# Altium footprint library C1210C226J8RAC7800.PcbLib: 3 footprints
Each footprint in its own frame and in the unit in brackets; x right, y up, seen from the top. Pads: shape width x height; smd on the part's side, far side on the other; paste and mask are expansions set on the pad; w line width, h text height; cw(c..) or ccw(c..) is an arc to the next point about the centre after c.
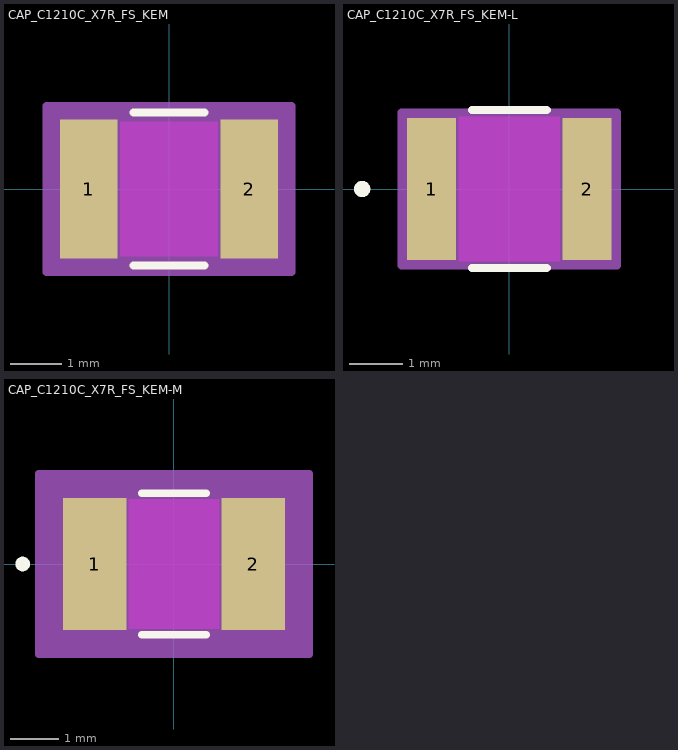
[diagram p0: the footprints below, top view; thin cyan lines are the x and y axes]

## CAP_C1210C_X7R_FS_KEM [mil]
pads (2):
  rect 44x106 smd paste+0 mask+0: 1(-61,0) 2(61,0)
Top Layer keep-out:
  region: -37,-51 -37,51 37,51 37,-51
Top Overlay:
  lines w6: -26.89,-58 26.89,-58 ; -26.89,58 26.89,58
Mechanical 13:
  lines w1: -69,-53 -69,53 ; -69,-53 69,-53 ; -69,-53 -39,-53 -39,53 -69,53 ; -69,-53 -69,53 ; -69,53 69,53 ; 69,-53 69,53 ; 69,-53 69,53 ; 69,-53 39,-53 39,53 69,53
Mechanical 15:
  region: 93,-63 -93,-63 -93,63 93,63
  lines w6: -93,-63 93,-63 93,63 -93,63 -93,-63
3D body "CAP_C1210C_X7R_FS_KEM.step": height 110, standoff 0, extent -69.02,-52.99 69.02,52.99

## CAP_C1210C_X7R_FS_KEM-L [mil]
pads (2):
  rect 36x104 smd paste+0 mask+0: 1(-57,0) 2(57,0)
Top Layer keep-out:
  region: -37,-51 -37,51 37,51 37,-51
Top Overlay:
  circle w6: c-108,0 r3
  lines w6: -27.35,-58 27.35,-58 ; -27.35,58 27.35,58
  text ".Designator" at -137.5,-25 h50
Keep-Out Layer:
  region: -37,-53 -37,53 37,53 37,-53
Mechanical 13:
  circle w1: c-52,0 r3
  lines w1: -69,-53 -69,53 ; -69,-53 -39,-53 -39,53 -69,53 ; -69,-53 69,-53 ; -69,-53 -69,53 ; -69,53 69,53 ; 69,-53 39,-53 39,53 69,53 ; 69,-53 69,53 ; 69,-53 69,53
  text ".Designator" at -137.5,-25 h50
Mechanical 15:
  region: 79,-56 -79,-56 -79,56 79,56
  lines w6: -79,-56 -79,56 79,56 79,-56 -79,-56
3D body "CAP_C1210C_X7R_FS_KEM.step": height 110, standoff 0, extent -69.02,-52.99 69.02,52.99

## CAP_C1210C_X7R_FS_KEM-M [mil]
pads (2):
  rect 52x108 smd paste+0 mask+0: 1(-65,0) 2(65,0)
Top Layer keep-out:
  region: -37,-51 -37,51 37,51 37,-51
Top Overlay:
  circle w6: c-124,0 r3
  lines w6: -26.53,-58 26.53,-58 ; -26.53,58 26.53,58
  text ".Designator" at -137.5,-25 h50
Keep-Out Layer:
  region: -37,-53 -37,53 37,53 37,-53
Mechanical 13:
  circle w1: c-60,0 r3
  lines w1: -69,-53 -69,53 ; -69,-53 -39,-53 -39,53 -69,53 ; -69,-53 69,-53 ; -69,-53 -69,53 ; -69,53 69,53 ; 69,-53 39,-53 39,53 69,53 ; 69,-53 69,53 ; 69,-53 69,53
  text ".Designator" at -137.5,-25 h50
Mechanical 15:
  region: 111,-74 -111,-74 -111,74 111,74
  lines w6: -111,-74 -111,74 111,74 111,-74 -111,-74
3D body "CAP_C1210C_X7R_FS_KEM.step": height 110, standoff 0, extent -69.02,-52.99 69.02,52.99